# Altium footprint library laboE_altium.PcbLib: 676 footprints (part 32 of 43)
Each footprint in its own frame and in the unit in brackets; x right, y up, seen from the top. Pads: shape width x height; smd on the part's side, far side on the other; paste and mask are expansions set on the pad; w line width, h text height; cw(c..) or ccw(c..) is an arc to the next point about the centre after c.
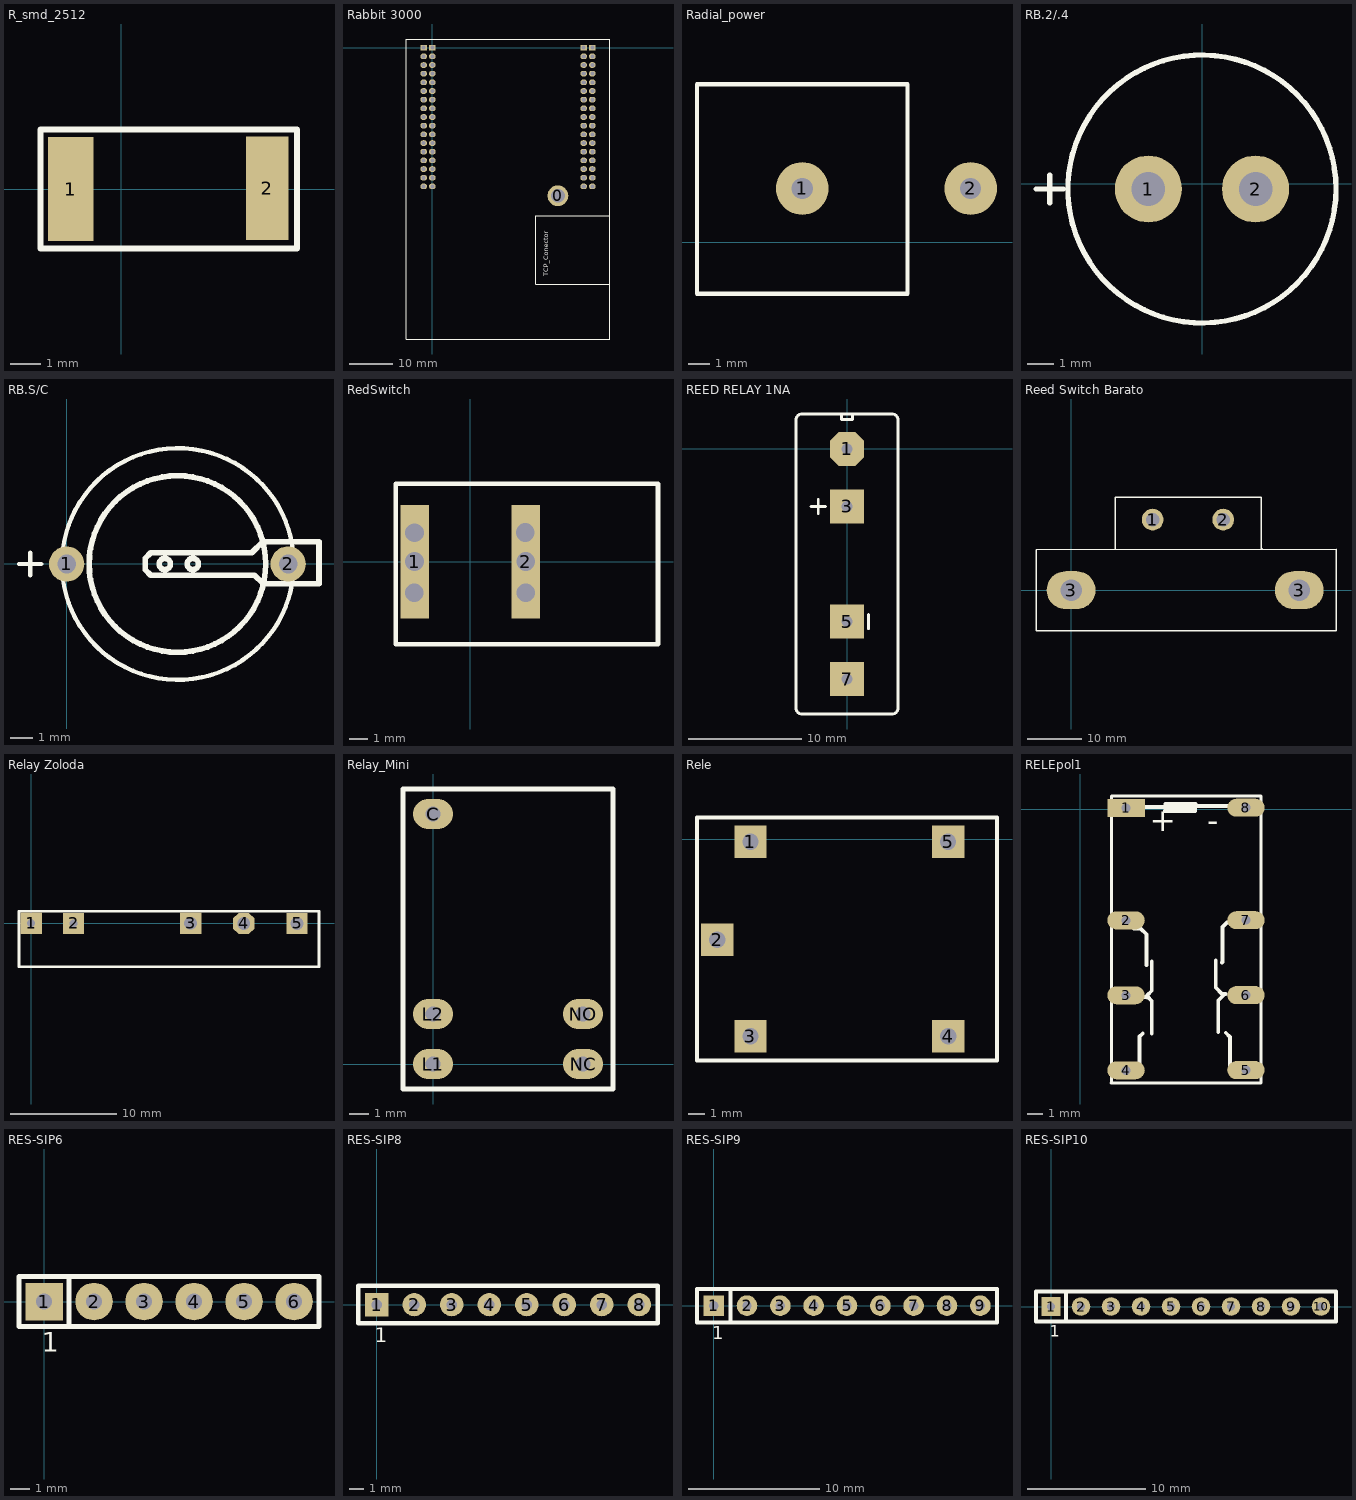
[diagram p31: the footprints below, top view; thin cyan lines are the x and y axes]

## R_smd_2512 [mm]
pads (2):
  rect 1.5x3.4 smd: 1(-1.65,0)
  rect 1.4x3.4 smd: 2(4.8,0.025)
Top Overlay:
  lines w0.2: -2.65,-1.95 -2.65,1.95 5.775,1.95 5.775,-1.95 -2.65,-1.95
3D body: height 1, standoff 0, extent -0.95,-1.54 4.15,1.59
3D body: height 1, standoff 0, extent -1.6,-1.54 -0.95,1.59
3D body: height 1, standoff 0, extent 4.15,-1.54 4.8,1.59

## Rabbit 3000 [mm]
pads (69):
  round 4.8 hole 3.2: 0(28.95,-34.15)
  rect 1.55x1.3 hole 0.95: 1(0,0) 1_B(36.9,0) 2(-2,0) 2_B(34.9,0)
  oval 1.55x1.3 hole 0.95: 3(0,-2) 3_B(36.9,-2) 4(-2,-2) 4_B(34.91,-2) 5(0,-4) 5_B(36.9,-4) 6(-2,-4.01) 6_B(34.91,-4) 7(0,-6) 7_B(36.9,-6) 8(-2,-6) 8_B(34.91,-6) 9(0,-8) 9_B(36.9,-8) 10(-2,-8) 10_B(34.91,-8) 11(0,-10) 11_B(36.9,-10) 12(-2,-10) 12_B(34.91,-10) 13(0,-12) 13_B(36.9,-12) 14(-2,-12) 14_B(34.91,-12) 15(0,-14) 15_B(36.9,-14) 16(-2,-14) 16_B(34.91,-14) 17(0,-16) 17_B(36.9,-16) 18(-2,-16) 18_B(34.91,-16) 19(0,-18) 19_B(36.9,-18) 20(-2,-18) 20_B(34.91,-18) 21(0,-20) 21_B(36.9,-20) 22(-2,-20) 22_B(34.91,-20) 23(0,-22) 23_B(36.9,-22) 24(-2,-22) 24_B(34.91,-22) 25(0,-24) 25_B(36.9,-24) 26(-2,-24) 26_B(34.91,-24) 27(0,-26) 27_B(36.9,-26) 28(-2,-26) 28_B(34.91,-26) 29(0,-28) 29_B(36.9,-28) 30(-2,-28) 30_B(34.91,-28) 31(0,-30) 31_B(36.9,-30) 32(-2,-30) 32_B(34.91,-30) 33(0,-32) 33_B(36.9,-32) 34(-2,-32) 34_B(34.91,-32)
Top Overlay:
  lines w0.254: 40.9,-54.6 23.9,-54.6 23.9,-38.8 40.9,-38.8 ; -6,-67.2 -6,2 40.9,2 40.9,-67.2 -6,-67.2
  text "TCP_Conector" at 26.78,-52.74 h1.1

## Radial_power [mm]
pads (2):
  round 2.5 hole 1: 1(12.45,2.55) 2(20.45,2.55)
Top Overlay:
  lines w0.2: 7.45,-2.45 7.45,7.5 17.45,7.5 17.45,-2.45 7.475,-2.45
3D body: height 30, standoff 0, extent 7.58,-2.35 17.36,7.42

## RB.2/.4 [mm]
pads (2):
  round 2.5 hole 1.254: 1(-2.004,-0.187) 2(1.996,-0.187)
Top Overlay:
  circle w0.2: c-0.004,-0.187 r5
  lines w0.2: -6.195,-0.187 -5.179,-0.187 ; -5.687,-0.695 -5.687,0.321
3D body: height 12.4, standoff 12, extent -2.992,-3.212 2.984,2.776
3D body: height 12.2, standoff 0.2, extent -3.972,-4.179 3.996,3.805
3D body: height 0, standoff -1, extent 1.599,-0.586 2.396,0.212
3D body: height 0, standoff -1, extent -2.401,-0.586 -1.604,0.212
3D body: height 10, standoff 7, extent 3.884,-0.562 4.009,-0.062
3D body: height 12, standoff 0.2, extent 3.421,-1.537 3.996,1.188
3D body: height 5, standoff 2, extent 3.884,-0.562 4.009,-0.062

## RB.S/C [mm]
height 5.5
pads (2):
  round 1.6 hole 0.85: 1(0,0) 2(10.033,0)
Top Overlay:
  circle w0.254: c5.715,0 r0.254
  circle w0.254: c4.445,0 r0.254
  circle w0.254: c5.017,0 r4
  circle w0.2: c5.037,0 r5.25
  lines w0.2: -2.159,0 -1.143,0 ; -1.651,-0.508 -1.651,0.508
  lines w0.254: 3.556,-0.254 3.556,0.254 3.81,0.508 8.382,0.508 8.89,1.016 10.795,1.016 11.43,1.016 11.43,-0.889 8.89,-0.889 8.509,-0.508 3.81,-0.508 3.556,-0.254
3D body: height 4.45, standoff 0.2, extent -0.56,-5.24 9.899,5.24
3D body: height 4.75, standoff 4.25, extent 1.048,-3.992 9.017,3.992
3D body: height 4.8, standoff 4.7, extent 3.575,-0.5 10.05,0.5
3D body: height 4.8, standoff -1, extent 9.636,-0.399 10.433,0.399
3D body: height 0.2, standoff -1, extent -0.397,-0.399 0.4,0.399

## RedSwitch [mm]
pads (2):
  rect 1.5x6 hole 1: 1(-2.937,0)
  rect 1.524x6 hole 1: 2(2.937,0)
via -2.963,-1.65 diameter 1.27 hole 1
via -2.937,1.525 diameter 1.27 hole 1
via 2.937,-1.65 diameter 1.27 hole 1
via 2.912,1.55 diameter 1.27 hole 1
Top Overlay:
  lines w0.254: -3.938,-4.375 -3.938,2.35 -3.938,4.121 9.937,4.121 9.937,-4.375 -3.938,-4.375
3D body: height 10, standoff 9, extent -4.29,-4.725 10.362,4.525
3D body: height 9, standoff 0, extent -4.065,-4.502 10.064,4.248
3D body: height 11, standoff 10, extent -2.763,-3.775 9.212,3.675
3D body: height 11.2, standoff 11.1, extent -1.112,-1 0.888,1
3D body: height 11.1, standoff 11, extent 4.538,-0.1 6.537,0.25

## REED RELAY 1NA [mm]
pads (4):
  oct 3x3 hole 1: 1(0,0)
  rect 3x3 hole 1: 3(0,-5.08) 5(0,-15.24) 7(0,-20.32)
Top Overlay:
  lines w0.254: -3.175,-5.08 -1.905,-5.08 ; -2.54,-5.715 -2.54,-4.445 ; -0.5,3.09 -0.5,2.59 0.5,2.59 0.5,3.09 ; 1.905,-15.875 1.905,-14.605 ; -4.5,-22.91 ccw(c-4,-22.91) -4,-23.41 4,-23.41 ccw(c4,-22.91) 4.5,-22.91 4.5,2.59 ccw(c4,2.59) 4,3.09 -3.5,3.09 -4,3.09 ccw(c-4,2.59) -4.5,2.59 -4.5,-22.91

## Reed Switch Barato [mm]
height 10.16
pads (4):
  round 4 hole 2.5: 1(15,13) 2(28,13)
  oval 9x7 hole 4: 3(0,0) 3(42,0)
Top Overlay:
  lines w0.254: 8.128,7.495 8.128,17.145 34.997,17.145 34.997,7.681 35.181,7.498 ; -6.477,-7.493 -6.477,7.493 48.768,7.499 48.768,-7.499 ; -6.477,-7.493 48.768,-7.499 ; -6.477,-7.493 48.768,-7.499

## Relay Zoloda [mm] "RZE012CO-2501I05A"
pads (5):
  rect 2x2 hole 0.762: 1(0,0) 2(3.984,-0.016)
  rect 2x2 hole 1.2: 3(14.986,0) 5(24.984,-0.016)
  oct 2x2 hole 1.2: 4(19.984,-0.016)
Top Overlay:
  lines w0.254: -1.143,-4.08 -1.143,1.127 27.051,1.127 27.051,-4.08 -1.143,-4.08

## Relay_Mini [mil]
pads (5):
  oval 80x60 / inner round 0 / far side oval 80x60 hole 30: C(0,500) L1(0,0) L2(0,100) NC(300,0) NO(300,100)
Top Overlay:
  lines w10: -60,-50 -60,550 360,550 360,-50 -60,-50

## Rele [mm]
pads (5):
  rect 2x2 hole 1: 1(5.1,-0.15) 2(3.05,-6.2) 3(5.1,-12.15) 4(17.3,-12.15) 5(17.29,-0.15)
Top Overlay:
  lines w0.254: 1.8,-13.65 1.8,1.35 6.975,1.35 20.31,1.35 20.31,-13.65 1.8,-13.65

## RELEpol1 [mm]
pads (8):
  rect 2.5x1.2 hole 0.6: 1(3.05,0.1)
  oval 2.5x1.2 hole 0.6: 2(3.05,-7.4) 3(3.05,-12.4) 4(3.05,-17.4) 5(11.05,-17.39) 6(11.05,-12.39) 7(11.05,-7.39) 8(11.05,0.11)
Top Overlay:
  lines w0.2: 2.055,-18.24 12.04,-18.24 12.04,0.9 2.085,0.9 2.085,-18.24
  lines w0.254: 3.05,0.1 3.1,0.15 5.67,0.15 ; 3.59,-7.94 4.02,-7.94 4.41,-8.33 4.41,-10.39 ; 3.95,-17.03 3.95,-15.15 4.16,-14.94 ; 4.16,-12.52 4.52,-12.52 4.77,-12.77 4.77,-14.94 ; 4.48,-12.56 4.48,-12.39 4.77,-12.1 4.77,-10.14 ; 9.03,-10.07 9.03,-11.89 9.45,-12.31 9.7,-12.31 9.63,-12.31 9.2,-12.74 9.2,-14.87 ; 9.45,-10.22 9.49,-10.18 9.49,-7.84 9.78,-7.55 10.2,-7.55 ; 9.7,-14.9 9.98,-15.18 9.98,-17.1 ; 9.97,0.24 9.95,0.22 7.57,0.22 7.5,0.15 5.67,0.15 ; 5.67,0.15 5.67,-0.08 5.65,-0.1 7.66,-0.1 7.66,0.04 7.66,0.33 7.69,0.36 5.69,0.36 5.69,0.13 5.67,0.15
  text "-" at 8.46,-1.5 h1.52
  text "+" at 4.64,-1.45 h1.52

## RES-SIP6 [mil] "1Com-5Res-SIP"
pads (6):
  rect 75x75 hole 32: 1(0,0)
  round 75 hole 32: 2(100,0) 3(200,0) 4(300,0) 5(400,0) 6(500,0)
Top Overlay:
  lines w10: 50,-50 50,50 ; -50,-50 550,-50 550,50 -50,50 -50,-50
  text "1" at -5,-100 h39.37

## RES-SIP8 [mil] "1Com-7Res-SIP"
pads (8):
  rect 62x62 hole 28: 1(0,0)
  round 62 hole 28: 2(100,0) 3(200,0) 4(300,0) 5(400,0) 6(500,0) 7(600,0) 8(700,0)
Top Overlay:
  lines w12: -50,-50 -50,50 750,50 750,-50 -50,-50
  text "1" at -5,-100 h39.37

## RES-SIP9 [mil] "1Com-8Res-SIP"
pads (9):
  rect 62x62 hole 28: 1(0,0)
  round 62 hole 28: 2(100,0) 3(200,0) 4(300,0) 5(400,0) 6(500,0) 7(600,0) 8(700,0) 9(800,0)
Top Overlay:
  lines w12: 50,-50 50,50 ; -50,-50 -50,50 850,50 850,-50 -50,-50
  text "1" at -5,-100 h39.37

## RES-SIP10 [mil] "1Com-9Res-SIP"
pads (10):
  rect 62x62 hole 28: 1(0,0)
  round 62 hole 28: 2(100,0) 3(200,0) 4(300,0) 5(400,0) 6(500,0) 7(600,0) 8(700,0) 9(800,0) 10(900,0)
Top Overlay:
  lines w12: 50,-50 50,50 ; -50,-50 950,-50 950,50 -50,50 -50,-50
  text "1" at -5,-100 h39.37